# Altium schematic symbol library C1H-10.SchLib: 1 symbol
Pins are listed as number, name and electrical type; pins without a type are passive.

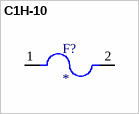
[diagram p0: symbol C1H-10]

## C1H-10
designator F?
MP: C1H-10; Package: None; Price: None; Value: *; Availability: Unavailable
footprint FUSC3215X85N
pins: 1, 2